# Altium footprint library MyLibrary.PcbLib: 43 footprints (part 1 of 3)
Each footprint in its own frame and in the unit in brackets; x right, y up, seen from the top. Pads: shape width x height; smd on the part's side, far side on the other; paste and mask are expansions set on the pad; w line width, h text height; cw(c..) or ccw(c..) is an arc to the next point about the centre after c.
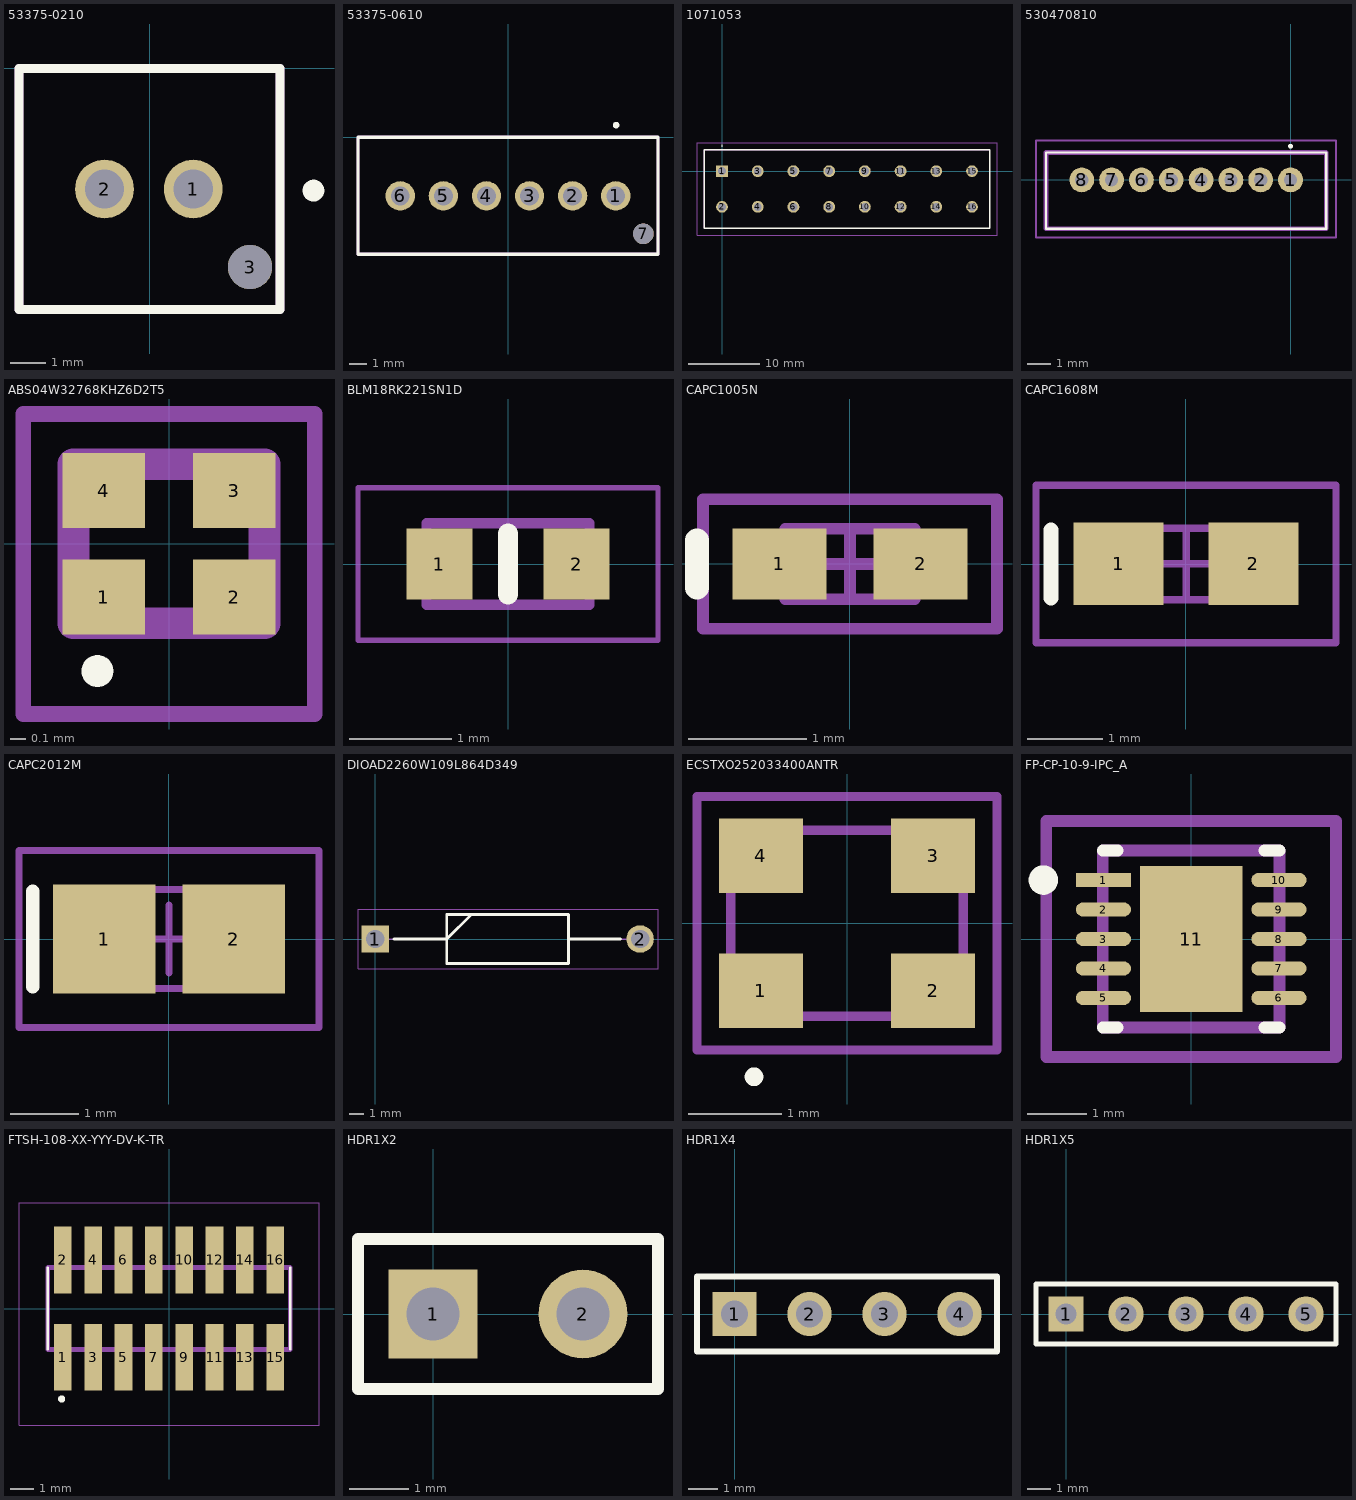
[diagram p0: the footprints below, top view; thin cyan lines are the x and y axes]

## 53375-0210 [mm]
pads (3):
  round 1.65 hole 1.1: 1(1.23,-3.4) 2(-1.27,-3.4)
  round 1.25 hole 1.25 unplated: 3(2.83,-5.6)
Top Overlay:
  circle w0.3: c4.618,-3.445 r0.156
  lines w0.254: -3.68,-6.8 3.68,-6.8 3.68,0 -3.68,0 -3.68,-6.8
Mechanical 13:
  lines w0.254: -3.68,-6.8 -3.68,0 3.68,0 3.68,-6.8 -3.68,-6.8
3D body "53375-0210.stp": height 11.37, standoff -3.56, extent -3.69,-6.77 3.71,0.03

## 53375-0610 [mm]
pads (7):
  round 1.7 hole 1.1: 1(6.25,-3.4) 2(3.75,-3.4) 3(1.25,-3.4) 4(-1.25,-3.4) 5(-3.75,-3.4) 6(-6.25,-3.4)
  round 1.2 hole 1.2 unplated: 7(7.85,-5.6)
Top Overlay:
  circle w0.2: c6.269,0.703 r0.092
  lines w0.2: -8.7,-6.8 -8.7,0 8.7,0 8.7,-6.8 -8.7,-6.8
Mechanical 13:
  lines w0.2: -8.7,-6.8 8.7,-6.8 8.7,0 -8.7,0 -8.7,-6.8
3D body "53375-0610.stp": height 11.39, standoff -3.54, extent -8.73,-6.79 8.67,0.01

## 1071053 [mm]
pads (16):
  rect 1.65x1.65 hole 1.1: 1(0,0)
  round 1.65 hole 1.1: 2(0,-5) 3(5,0) 4(5,-5) 5(10,0) 6(10,-5) 7(15,0) 8(15,-5) 9(20,0) 10(20,-5) 11(25,0) 12(25,-5) 13(30,0) 14(30,-5) 15(35,0) 16(35,-5)
Top Overlay:
  lines w0.1: 0,3.5 ccw(c0,3.55) 0,3.6 ccw(c0,3.55) 0,3.5
  lines w0.2: -2.5,-8 37.5,-8 37.5,3 -2.5,3 -2.5,-8
Mechanical 13:
  lines w0.1: -2.5,-8 37.5,-8 37.5,3 -2.5,3 -2.5,-8
Mechanical 15:
  lines w0.1: -3.5,-9 38.5,-9 38.5,4 -3.5,4 -3.5,-9
3D body "1071053.stp": height 10.11, standoff -2.69, extent -2.5,-8.03 37.5,3.02

## 530470810 [mm]
pads (8):
  round 1.04 hole 0.55 mask+0: 1(0,0) 2(-1.25,0) 3(-2.5,0) 4(-3.75,0) 5(-5,0) 6(-6.25,0) 7(-7.5,0) 8(-8.75,0)
Top Overlay:
  lines w0.1: -10.25,-2.05 -10.25,1.15 1.5,1.15 1.5,-2.05 -10.25,-2.05 ; 0,1.365 cw(c0,1.415) 0,1.465 cw(c0,1.415) 0,1.365
Mechanical 13:
  lines w0.2: -10.25,-2.05 -10.25,1.15 1.5,1.15 1.5,-2.05 -10.25,-2.05
Mechanical 15:
  lines w0.1: -10.668,-2.413 -10.668,1.651 1.905,1.651 1.905,-2.413 -10.668,-2.413
3D body "53047-0810.stp": height 4.23, standoff -2.27, extent -10.195,-2 1.555,1.2

## ABS04W32768KHZ6D2T5 [mm]
pads (4):
  rect 0.52x0.47 smd: 1(-0.41,-0.335) 2(0.41,-0.335) 3(0.41,0.335) 4(-0.41,0.335)
Top Overlay:
  lines w0.1: -0.5,-0.8 cw(c-0.45,-0.8) -0.4,-0.8 cw(c-0.45,-0.8) -0.5,-0.8
Mechanical 13:
  lines w0.2: -0.6,-0.5 -0.6,0.5 0.6,0.5 0.6,-0.5 -0.6,-0.5
Mechanical 15:
  lines w0.1: -0.916,-1.07 -0.916,0.816 0.916,0.816 0.916,-1.07 -0.916,-1.07
3D body "ABS04W-32.768KHZ-6-D2-T5.stp": height 0.34, standoff 0, extent -0.6,-0.5 0.6,0.5

## BLM18RK221SN1D [mm]
pads (2):
  rect 0.65x0.7 smd: 1(-0.675,0) 2(0.675,0)
Top Overlay:
  lines w0.2: 0,-0.3 0,0.3
Mechanical 13:
  lines w0.1: -0.8,-0.4 -0.8,0.4 0.8,0.4 0.8,-0.4 -0.8,-0.4
Mechanical 15:
  lines w0.05: -1.475,-0.75 -1.475,0.75 1.475,0.75 1.475,-0.75 -1.475,-0.75
3D body "BLM18RK221SN1D.stp": height 0.8, standoff 0, extent -0.8,-0.4 0.8,0.4

## CAPC1005N [mm] "Chip Capacitor, Body 1.0x0.5mm, IPC Medium Density"
height 0.6
pads (2):
  rect 0.8x0.6 smd: 1(-0.6,0) 2(0.6,0)
Top Overlay:
  lines w0.2: -1.3,-0.2 -1.3,0.2
Top 3D Body:
  lines w0.1: -0.55,-0.3 0.55,-0.3 0.55,0.3 -0.55,0.3 -0.55,-0.3
Top Courtyard:
  lines w0.1: -0.3,0 0.3,0 ; 0,-0.3 0,0.3 ; -1.25,-0.55 1.25,-0.55 1.25,0.55 -1.25,0.55 -1.25,-0.55
3D body "CAPC1005X55N EIA 0402.step": height 0.55, standoff 0, extent -0.5,-0.25 0.5,0.25

## CAPC1608M [mm] "Chip Capacitor, Body 1.6x0.8mm, IPC Low Density"
height 0.85
pads (2):
  rect 1.2x1.1 smd: 1(-0.9,0) 2(0.9,0)
Top Overlay:
  lines w0.2: -1.8,-0.45 -1.8,0.45
Top 3D Body:
  lines w0.1: -0.875,-0.475 -0.875,0.475 0.875,0.475 0.875,-0.475 -0.875,-0.475
Top Courtyard:
  lines w0.1: -0.475,0 0.475,0 ; 0,-0.475 0,0.475 ; -2,-1.05 -2,1.05 2,1.05 2,-1.05 -2,-1.05
3D body "CAPC1608X55N EIA 0603.step": height 0.55, standoff 0, extent -0.8,-0.4 0.8,0.4
3D body: height 0.85, standoff 0, extent -0.875,-0.475 0.875,0.475

## CAPC2012M [mm] "Chip Capacitor, Body 2.0x1.3mm, IPC Low Density"
height 1.1
pads (2):
  rect 1.5x1.6 smd: 1(-0.95,0) 2(0.95,0)
Top Overlay:
  lines w0.2: -2,-0.7 -2,0.7
Top 3D Body:
  lines w0.1: -1.1,-0.725 -1.1,0.725 1.1,0.725 1.1,-0.725 -1.1,-0.725
Top Courtyard:
  lines w0.1: -0.5,0 0.5,0 ; 0,-0.5 0,0.5 ; -2.2,-1.3 -2.2,1.3 2.2,1.3 2.2,-1.3 -2.2,-1.3
3D body "CAPC2012X90N EIA 0805.step": height 0.9, standoff 0, extent -1,-0.6 1,0.6
3D body: height 1.1, standoff 0, extent -1.1,-0.725 1.1,0.725

## DIOAD2260W109L864D349 [mm]
pads (2):
  rect 1.95x1.95 / inner round 1.95 / far side rect 1.95x1.95 hole 1.3: 1(0,0)
  round 1.95 hole 1.3: 2(18.796,0)
Top Overlay:
  lines w0.2: 1.325,0 5.077,0 6.823,1.745 ; 13.713,0 17.399,0 ; 5.077,-1.745 5.077,1.745 13.713,1.745 13.713,-1.745 5.077,-1.745
Mechanical 15:
  lines w0.1: 0,0 5.08,0 ; 5.077,0 6.822,1.745 ; 13.713,0 18.796,0 ; 5.077,-1.745 5.077,1.745 13.712,1.745 13.712,-1.745 5.077,-1.745
Bottom Assembly:
  lines w0.05: -1.225,-2.095 -1.225,2.095 20.066,2.095 20.066,-2.095 -1.225,-2.095

## ECSTXO252033400ANTR [mm]
pads (4):
  rect 0.9x0.8 smd: 1(-0.925,-0.725) 2(0.925,-0.725) 3(0.925,0.725) 4(-0.925,0.725)
Top Overlay:
  lines w0.1: -1,-1.7 ccw(c-1,-1.65) -1,-1.6 ccw(c-1,-1.65) -1,-1.7
Mechanical 13:
  lines w0.1: -1.25,-1 -1.25,1 1.25,1 1.25,-1 -1.25,-1
Mechanical 15:
  lines w0.1: -1.613,-1.363 -1.613,1.363 1.613,1.363 1.613,-1.363 -1.613,-1.363
3D body "ECS-TXO-2520-33-400-AN-TR.stp": height 1.1, standoff 0, extent -1.295,-1.045 1.295,1.045

## FP-CP-10-9-IPC_A [mm]
pads (11):
  rect 0.936x0.242 smd mask+0.05: 1(-1.488,1)
  rrect100% 0.936x0.242 smd mask+0.05: 2(-1.488,0.5) 3(-1.488,0) 4(-1.488,-0.5) 5(-1.488,-1) 6(1.488,-1) 7(1.488,-0.5) 8(1.488,0) 9(1.488,0.5) 10(1.488,1)
  rect 1.74x2.48 smd mask+0: 11(0,0)
Top Overlay:
  circle w0.25: c-2.506,1 r0.125
  lines w0.2: -1.5,-1.496 -1.5,-1.5 -1.245,-1.5 ; -1.5,1.496 -1.5,1.5 -1.245,1.5 ; 1.245,-1.5 1.5,-1.5 1.5,-1.496 ; 1.245,1.5 1.5,1.5 1.5,1.496
Top Paste:
  rectangle: -0.497,-0.867 0.497,0.867
Top 3D Body:
  lines w0.2: -1.5,-1.5 1.5,-1.5 1.5,1.5 -1.5,1.5 -1.5,-1.5
Top Courtyard:
  lines w0.2: -2.456,-2 2.456,-2 2.456,2 -2.456,2 -2.456,-2
Top Component Center:
  lines w0.1: -0.5,0 0.5,0 ; 0,-0.5 0,0.5
Top Assembly:
  lines w0.2: -2.456,-2 2.456,-2 2.456,2 -2.456,2 -2.456,-2
  text ".Designator" at 0,0.188 h1
3D body "IC_Analog_Devices_ADP7157ACPZ-03-R7_eec.STEP": height 0.25, standoff 0, extent -2.456,-2 2.456,2

## FTSH-108-XX-YYY-DV-K-TR [mm]
pads (16):
  rect 0.74x2.79 smd: 1(-4.445,-2.035) 2(-4.445,2.035) 3(-3.175,-2.035) 4(-3.175,2.035) 5(-1.905,-2.035) 6(-1.905,2.035) 7(-0.635,-2.035) 8(-0.635,2.035) 9(0.635,-2.035) 10(0.635,2.035) 11(1.905,-2.035) 12(1.905,2.035) 13(3.175,-2.035) 14(3.175,2.035) 15(4.445,-2.035) 16(4.445,2.035)
Top Overlay:
  circle w0.2: c-4.495,-3.785 r0.05
  lines w0.1: -5.08,-1.715 -5.08,1.715 ; 5.08,-1.715 5.08,1.715
Mechanical 13:
  lines w0.2: -5.08,-1.715 -5.08,1.715 5.08,1.715 5.08,-1.715 -5.08,-1.715
Mechanical 15:
  lines w0.05: -6.28,-4.885 -6.28,4.43 6.28,4.43 6.28,-4.885 -6.28,-4.885

## HDR1X2 [mm] "Connector; Header; 2 Position"
pads (2):
  rect 1.5x1.5 hole 0.9: 1(0,0)
  round 1.5 hole 0.9: 2(2.54,0)
Top Overlay:
  lines w0.2: -1.27,-1.27 3.81,-1.27 3.81,1.27 -1.27,1.27 -1.27,-1.27

## HDR1X4 [mm] "Connector; Header; 4 Position"
pads (4):
  rect 1.5x1.5 hole 0.9: 1(0,0)
  round 1.5 hole 0.9: 2(2.54,0) 3(5.08,0) 4(7.62,0)
Top Overlay:
  lines w0.2: -1.27,-1.27 8.89,-1.27 8.89,1.27 -1.27,1.27 -1.27,-1.27

## HDR1X5 [mm] "Connector; Header; 5 Position"
pads (5):
  rect 1.5x1.5 hole 0.9: 1(0,0)
  round 1.5 hole 0.9: 2(2.54,0) 3(5.08,0) 4(7.62,0) 5(10.16,0)
Top Overlay:
  lines w0.2: -1.27,-1.27 -1.27,1.27 11.43,1.27 11.43,-1.27 -1.27,-1.27